# Altium footprint library MBR120VLSFT1G.PcbLib: 3 footprints
Each footprint in its own frame and in the unit in brackets; x right, y up, seen from the top. Pads: shape width x height; smd on the part's side, far side on the other; paste and mask are expansions set on the pad; w line width, h text height; cw(c..) or ccw(c..) is an arc to the next point about the centre after c.
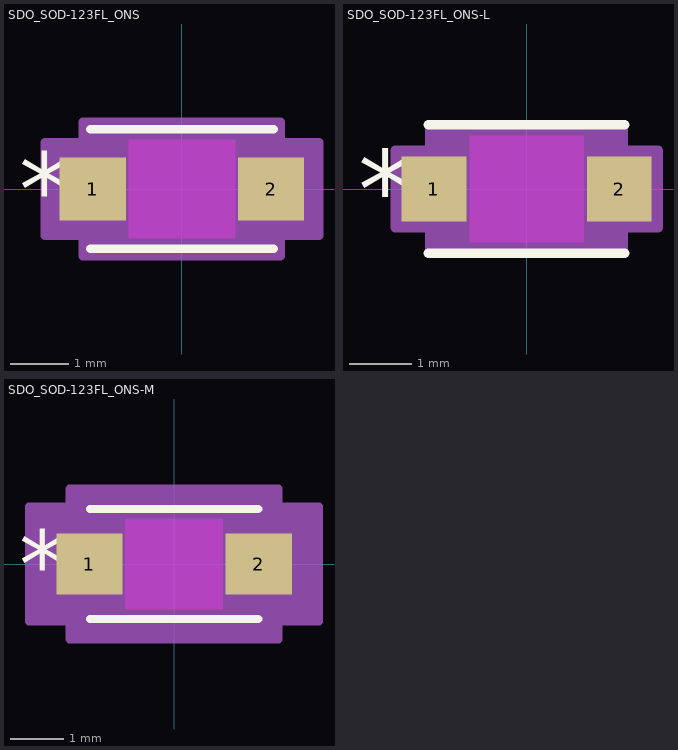
[diagram p0: the footprints below, top view; thin cyan lines are the x and y axes]

## SDO_SOD-123FL_ONS [mil]
pads (2):
  rect 44.87x43 smd paste+0 mask+0: 1(-60.44,0) 2(60.44,0)
Top Layer keep-out:
  region: -36,-33.5 -36,33.5 36,33.5 36,-33.5
Top Overlay:
  lines w6: -62,-40.5 62,-40.5 ; -62,40.5 62,40.5
  text ".Designator" at -137.5,-25 h50
  text "*" at -110.37,-25 h50
Keep-Out Layer:
  region: -36,-33.5 -36,33.5 36,33.5 36,-33.5
Mechanical 13:
  lines w1: -57,-17.75 -39.25,-35.5 ; -57,17.75 -39.25,35.5 ; -75,-21.5 -75,21.5 -57,21.5 -57,-21.5 -75,-21.5 ; -57,-35.5 57,-35.5 57,35.5 -57,35.5 -57,-35.5 ; 57,-21.5 57,21.5 75,21.5 75,-21.5 57,-21.5
  text "*" at -59.5,-25 h50
  text ".Designator" at -137.5,-25 h50
Mechanical 15:
  region: -67,-31.5 -92.87,-31.5 -92.87,31.5 -67,31.5 -67,45.5 67,45.5 67,31.5 92.87,31.5 92.87,-31.5 67,-31.5 67,-45.5 -67,-45.5
  lines w6: -92.87,-31.5 -92.87,31.5 -67,31.5 -67,45.5 67,45.5 67,31.5 92.87,31.5 92.87,-31.5 67,-31.5 67,-45.5 -67,-45.5 -67,-31.5 -92.87,-31.5
3D body "SDO_SOD-123FL_ONS.step": height 39.25, standoff 0, extent -75,-35.51 75,35.51

## SDO_SOD-123FL_ONS-L [mil]
pads (2):
  rect 40.94x41.03 smd paste+0 mask+0: 1(-58.47,0) 2(58.47,0)
Top Layer keep-out:
  region: -36,-33.5 -36,33.5 36,33.5 36,-33.5
Top Overlay:
  lines w6: -62,-40.5 62,-40.5 ; -62,40.5 62,40.5
  text ".Designator" at -137.5,-25 h50
  text "*" at -106.44,-25 h50
Keep-Out Layer:
  region: -36,-33.5 -36,33.5 36,33.5 36,-33.5
Mechanical 13:
  lines w1: -57,-17.75 -39.25,-35.5 ; -57,17.75 -39.25,35.5 ; -75,-21.5 -75,21.5 -57,21.5 -57,-21.5 -75,-21.5 ; -57,-35.5 57,-35.5 57,35.5 -57,35.5 -57,-35.5 ; 57,-21.5 57,21.5 75,21.5 75,-21.5 57,-21.5
  text "*" at -59.5,-25 h50
  text ".Designator" at -137.5,-25 h50
Mechanical 15:
  region: -61,-24.52 -82.94,-24.52 -82.94,24.52 -61,24.52 -61,39.5 61,39.5 61,24.52 82.94,24.52 82.94,-24.52 61,-24.52 61,-39.5 -61,-39.5
  lines w6: -82.94,-24.52 -82.94,24.52 -61,24.52 -61,39.5 61,39.5 61,24.52 82.94,24.52 82.94,-24.52 61,-24.52 61,-39.5 -61,-39.5 -61,-24.52 -82.94,-24.52
3D body "SDO_SOD-123FL_ONS.step": height 39.25, standoff 0, extent -75,-35.51 75,35.51

## SDO_SOD-123FL_ONS-M [mil]
pads (2):
  rect 48.81x44.97 smd paste+0 mask+0: 1(-62.41,0) 2(62.41,0)
Top Layer keep-out:
  region: -36,-33.5 -36,33.5 36,33.5 36,-33.5
Top Overlay:
  lines w6: -62,-40.5 62,-40.5 ; -62,40.5 62,40.5
  text ".Designator" at -137.5,-25 h50
  text "*" at -114.31,-25 h50
Keep-Out Layer:
  region: -36,-33.5 -36,33.5 36,33.5 36,-33.5
Mechanical 13:
  lines w1: -57,-17.75 -39.25,-35.5 ; -57,17.75 -39.25,35.5 ; -75,-21.5 -75,21.5 -57,21.5 -57,-21.5 -75,-21.5 ; -57,-35.5 57,-35.5 57,35.5 -57,35.5 -57,-35.5 ; 57,-21.5 57,21.5 75,21.5 75,-21.5 57,-21.5
  text "*" at -59.5,-25 h50
  text ".Designator" at -137.5,-25 h50
Mechanical 15:
  region: -77,-42.48 -106.81,-42.48 -106.81,42.48 -77,42.48 -77,55.5 77,55.5 77,42.48 106.81,42.48 106.81,-42.48 77,-42.48 77,-55.5 -77,-55.5
  lines w6: -106.81,-42.48 -106.81,42.48 -77,42.48 -77,55.5 77,55.5 77,42.48 106.81,42.48 106.81,-42.48 77,-42.48 77,-55.5 -77,-55.5 -77,-42.48 -106.81,-42.48
3D body "SDO_SOD-123FL_ONS.step": height 39.25, standoff 0, extent -75,-35.51 75,35.51